# EAGLE library part IC_DFN-8+G (library dp_devices.v6)
universal chip DFN-8 package with pad
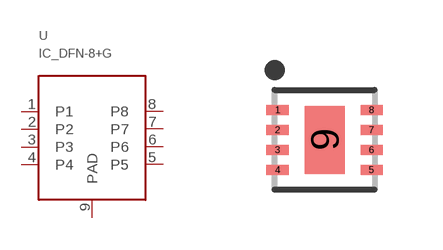
[diagram p198: symbol with the pads of DFN-8_25X25; footprint DFN-8_25X25]

Designator prefix U

## IC_DFN-8+G  [DFN-8_25X25]
1  P1  pas
2  P2  pas
3  P3  pas
4  P4  pas
5  P5  pas
6  P6  pas
7  P7  pas
8  P8  pas
9  PAD  pas

## Footprint DFN-8_25X25 (pad centres in mm)
smd 0.55 x 0.25: 1 -1.175,0.75; 2 -1.175,0.25; 3 -1.175,-0.25; 4 -1.175,-0.75; 5 1.175,-0.75; 6 1.175,-0.25; 7 1.175,0.25; 8 1.175,0.75
smd 1 x 1.7: 9 0,0